# Altium schematic symbol library GRM188R71E104KA01D.SchLib: 1 symbol
Pins are listed as number, name and electrical type; pins without a type are passive.

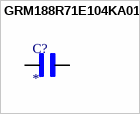
[diagram p0: symbol GRM188R71E104KA01D]

## GRM188R71E104KA01D
designator C?
SMD Capacitor X7R(EIA) with Capacitance: 0.10uF Tol. 10%. Rated Voltage: 25Vdc; MF: Murata Electronics; MP: GRM188R71E104KA01D; SnapEDA_Link: https://www.snapeda.com/parts/GRM188R71E104KA01D/Murata+Electronics+North+America/view-part/?ref=snap; Package: 1608 Murata; Value: *; Check_prices: https://www.snapeda.com/parts/GRM188R71E104KA01D/Murata+Electronics+North+America/view-part/?ref=eda
footprint CAPC1608X90N
pins: 1, 2